# Altium integrated library C5750X7R1H106K230KB.IntLib: 1 symbol
Pins are listed as number, name and electrical type; pins without a type are passive.

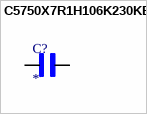
[diagram p0: symbol C5750X7R1H106K230KB]

## C5750X7R1H106K230KB
designator C?
Cap Ceramic 10uF 50V X7R 10% Pad SMD 2220 125Â°C Low ESR T/R; MF: TDK Corporation; MP: C5750X7R1H106K230KB; SnapEDA_Link: https://www.snapeda.com/parts/C5750X7R1H106K230KB/TDK/view-part/?ref=snap; Package: 5750-2 TDK; Value: *; Check_prices: https://www.snapeda.com/parts/C5750X7R1H106K230KB/TDK/view-part/?ref=eda
footprint CAP_C5750X7R1H106K230KB
pins: 1, 2